# Altium footprint library chipfc_libs.PCBLIB: 315 footprints (part 20 of 20)
Each footprint in its own frame and in the unit in brackets; x right, y up, seen from the top. Pads: shape width x height; smd on the part's side, far side on the other; paste and mask are expansions set on the pad; w line width, h text height; cw(c..) or ccw(c..) is an arc to the next point about the centre after c.
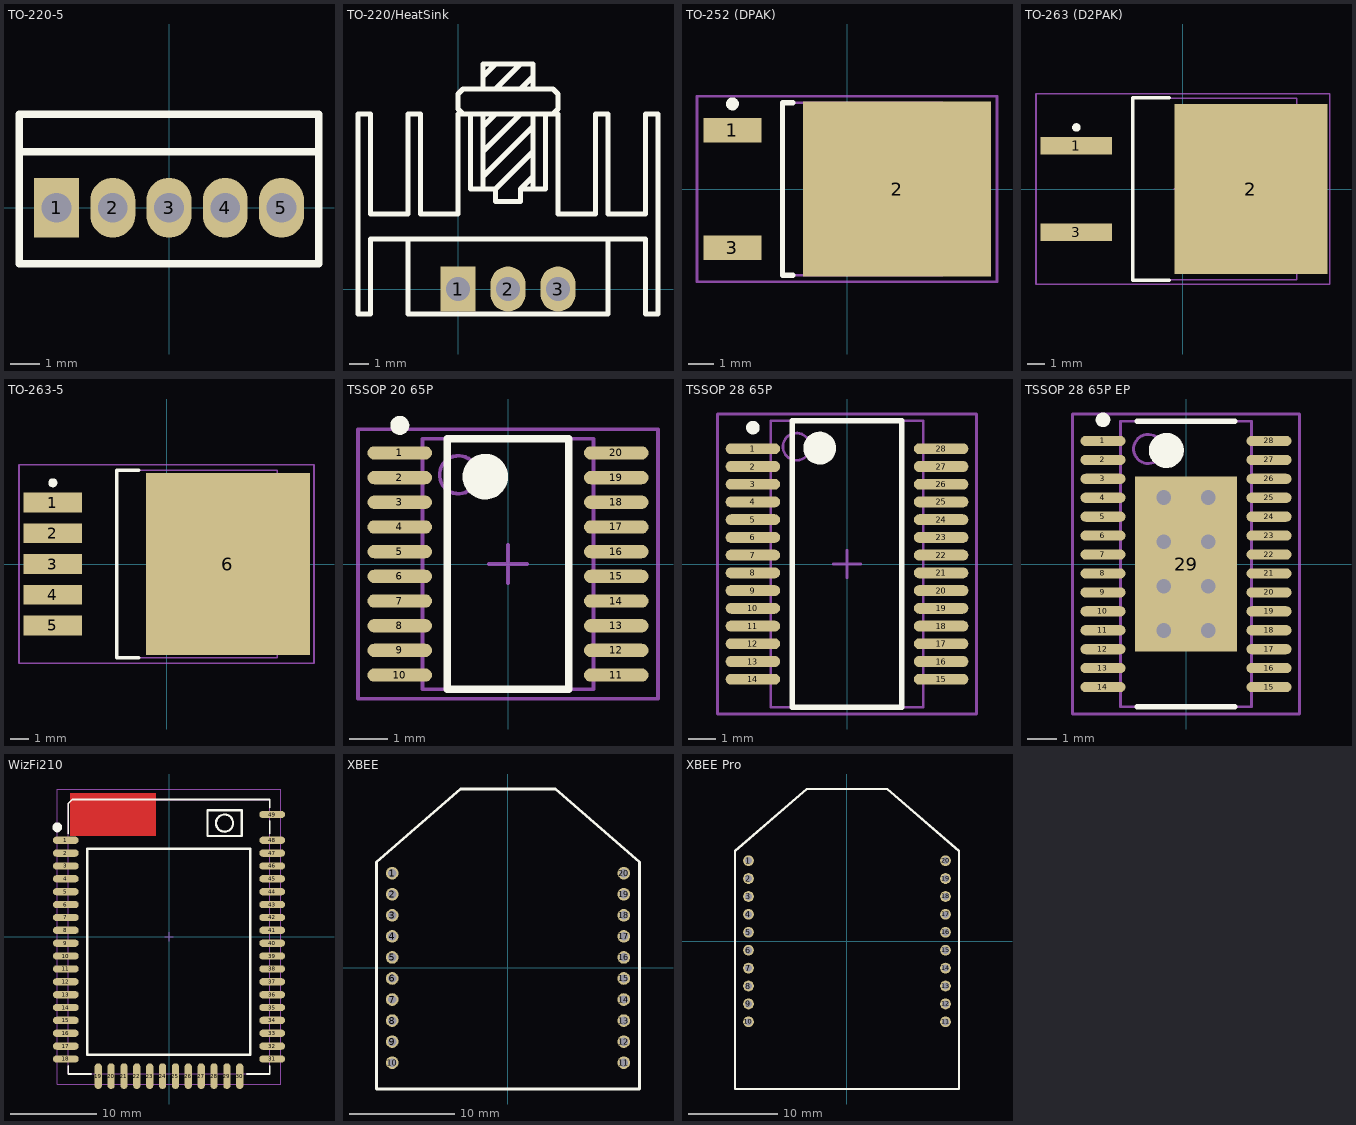
[diagram p19: the footprints below, top view; thin cyan lines are the x and y axes]

## TO-220-5 [mil]
pads (5):
  rect 60x80 hole 39.37: 1(-150,0)
  oval 60x80 hole 39.37: 2(-75,0) 3(0,0) 4(75,0) 5(150,0)
Top Overlay:
  lines w10: -200,75 200,75 ; -200,-75 200,-75 200,125 -200,125 -200,-75

## TO-220/HeatSink [mil]
pads (3):
  rect 70x90 / inner rect 70x70 / far side rect 70x90 hole 47.24: 1(0,0)
  oval 70x90 / inner round 70 / far side oval 70x90 hole 47.24: 2(100,0) 3(200,0)
Top Overlay:
  lines w10: -100,100 -100,-50 300,-50 300,100 ; 50,200 50,350 ; 50,225 150,325 ; 50,275 125,350 ; 50,325 75,350 ; 50,400 50,450 150,450 150,400 ; 50,425 75,450 ; 75,400 125,450 ; 125,400 150,425 ; 150,200 150,350 ; 150,225 125,200 ; 150,275 75,200 ; 75,200 25,200 25,350 0,350 0,150 -75,150 -75,350 -100,350 -100,150 -175,150 -175,350 -200,350 -200,100 -200,-50 -175,-50 -175,100 375,100 375,-50 400,-50 400,100 400,350 375,350 375,150 300,150 300,350 275,350 275,150 200,150 200,350 10,350 0,360 0,390 10,400 190,400 200,390 200,360 190,350 175,350 175,200 125,200 ; 75,200 75,175 125,175 125,200
3D body "CircuitWorks-TO-220HS.step": height 805, standoff -75, extent -100,-50 300,130
3D body "User Library-heatsink TO126.step": height 984.25, standoff -149.61, extent -190.97,-51.58 390.97,373.67

## TO-252 (DPAK) [mm] "D-PAK, 3-Pads, Body 6.2x6.7mm (max), IPC Medium Density"
height 2.4
pads (3):
  rect 2.25x0.95 smd: 1(-4.45,2.28) 3(-4.45,-2.28)
  rect 7.3x6.8 smd: 2(1.95,0)
Top Overlay:
  circle w0.25: c-4.45,3.305 r0.125
  lines w0.2: -2.1,-3.35 -2.5,-3.35 -2.5,3.35 -2.1,3.35
Mechanical 13:
  lines w0.1: -2.5,-3.35 -2.5,3.35 3.7,3.35 3.7,-3.35 -2.5,-3.35
Mechanical 15:
  lines w0.1: -0.5,0 0.5,0 ; 0,-0.5 0,0.5 ; -5.825,-3.6 -5.825,3.6 5.825,3.6 5.825,-3.6 -5.825,-3.6
3D body "User Library-DPAK-1.step": height 2.41, standoff 0, extent -4.541,-3.27 5.398,3.27

## TO-263 (D2PAK) [mm]
height 4.83
pads (3):
  rect 4.2x1.05 smd: 1(-6.25,2.54) 3(-6.25,-2.54)
  rect 9x10 smd: 2(4,0)
Top Overlay:
  circle w0.25: c-6.25,3.615 r0.125
  lines w0.2: -0.8,-5.35 -2.95,-5.35 -2.95,5.35 -0.8,5.35
Mechanical 13:
  lines w0.1: -2.95,-5.325 6.7,-5.325 6.7,5.325 -2.95,5.325 -2.95,-5.325
Mechanical 15:
  lines w0.1: -0.5,0 0.5,0 ; 0,-0.5 0,0.5 ; -8.625,-5.6 8.625,-5.6 8.625,5.6 -8.625,5.6 -8.625,-5.6
3D body "SW3dPS-TO263-3S.STEP": height 4.78, standoff -0.02, extent -7.53,-5 8.14,5

## TO-263-5 [mm] "D2-PAK, 6-Pads, Body 8.9x10.4mm (max), IPC Medium Density"
height 4.65
pads (6):
  rect 3.25x1.1 smd: 1(-6.3,3.4) 2(-6.3,1.7) 3(-6.3,0) 4(-6.3,-1.7) 5(-6.3,-3.4)
  rect 9.1x10.1 smd: 6(3.4,0)
Top Overlay:
  circle w0.25: c-6.3,4.5 r0.125
  lines w0.2: -1.55,-5.2 -2.75,-5.2 -2.75,5.2 -1.55,5.2
Mechanical 13:
  lines w0.1: -2.75,-5.2 -2.75,5.2 6.14,5.2 6.14,-5.2 -2.75,-5.2
Mechanical 15:
  lines w0.1: -0.5,0 0.5,0 ; 0,-0.5 0,0.5 ; -8.175,-5.5 -8.175,5.5 8.175,5.5 8.175,-5.5 -8.175,-5.5
3D body "SW3dPS-TO263-5.STEP": height 4.83, standoff 0.03, extent -7.556,-4.978 8.114,5.022

## TSSOP 20 65P [mm] "TSOP, 20-Leads, Body 6.6x4.5mm (max), Pitch 0.65mm, IPC Medium Density"
height 1.1
pads (20):
  oval 1.7x0.35 smd: 1(-2.85,2.925) 2(-2.85,2.275) 3(-2.85,1.625) 4(-2.85,0.975) 5(-2.85,0.325) 6(-2.85,-0.325) 7(-2.85,-0.975) 8(-2.85,-1.625) 9(-2.85,-2.275) 10(-2.85,-2.925) 11(2.85,-2.925) 12(2.85,-2.275) 13(2.85,-1.625) 14(2.85,-0.975) 15(2.85,-0.325) 16(2.85,0.325) 17(2.85,0.975) 18(2.85,1.625) 19(2.85,2.275) 20(2.85,2.925)
Top Overlay:
  circle w0.25: c-2.85,3.65 r0.125
  circle w0.6: c-0.6,2.3 r0.3
  lines w0.2: -1.6,-3.3 -1.6,3.3 1.6,3.3 1.6,-3.3 -1.6,-3.3
Mechanical 13:
  circle w0.1: c-1.3,2.35 r0.5
  lines w0.1: -2.25,-3.3 -2.25,3.3 2.25,3.3 2.25,-3.3 -2.25,-3.3
Mechanical 15:
  lines w0.1: -0.5,0 0.5,0 ; 0,-0.5 0,0.5 ; -3.95,-3.55 -3.95,3.55 3.95,3.55 3.95,-3.55 -3.95,-3.55
3D body "TSSOP-20.STEP": height 1, standoff 0, extent -3.2,-3.25 3.21,3.25

## TSSOP 28 65P [mm] "SOP, 28-Leads, Body 10.5x5.6mm (max), Pitch 0.65mm, IPC Medium Density"
height 2
pads (28):
  oval 2x0.4 smd: 1(-3.45,4.225) 2(-3.45,3.575) 3(-3.45,2.925) 4(-3.45,2.275) 5(-3.45,1.625) 6(-3.45,0.975) 7(-3.45,0.325) 8(-3.45,-0.325) 9(-3.45,-0.975) 10(-3.45,-1.625) 11(-3.45,-2.275) 12(-3.45,-2.925) 13(-3.45,-3.575) 14(-3.45,-4.225) 15(3.45,-4.225) 16(3.45,-3.575) 17(3.45,-2.925) 18(3.45,-2.275) 19(3.45,-1.625) 20(3.45,-0.975) 21(3.45,-0.325) 22(3.45,0.325) 23(3.45,0.975) 24(3.45,1.625) 25(3.45,2.275) 26(3.45,2.925) 27(3.45,3.575) 28(3.45,4.225)
Top Overlay:
  circle w0.6: c-1,4.25 r0.3
  circle w0.25: c-3.45,5 r0.125
  lines w0.2: -2,-5.25 2,-5.25 2,5.25 -2,5.25 -2,-5.25
Mechanical 13:
  circle w0.1: c-1.85,4.3 r0.5
  lines w0.1: -2.8,-5.25 2.8,-5.25 2.8,5.25 -2.8,5.25 -2.8,-5.25
Mechanical 15:
  lines w0.1: -0.5,0 0.5,0 ; 0,-0.5 0,0.5 ; -4.75,-5.5 4.75,-5.5 4.75,5.5 -4.75,5.5 -4.75,-5.5
3D body "SW3dPS-TSSOP-28_P065.STEP": height 0.97, standoff -0.02, extent -3.2,-4.85 3.2,4.85

## TSSOP 28 65P EP [mm] "TSOP, 28-Leads, Body 9.8x4.5mm (max), Pitch 0.65mm, IPC Medium Density"
height 1.1
pads (29):
  oval 1.55x0.35 smd: 1(-2.85,4.225) 2(-2.85,3.575) 3(-2.85,2.925) 4(-2.85,2.275) 5(-2.85,1.625) 6(-2.85,0.975) 7(-2.85,0.325) 8(-2.85,-0.325) 9(-2.85,-0.975) 10(-2.85,-1.625) 11(-2.85,-2.275) 12(-2.85,-2.925) 13(-2.85,-3.575) 14(-2.85,-4.225) 15(2.85,-4.225) 16(2.85,-3.575) 17(2.85,-2.925) 18(2.85,-2.275) 19(2.85,-1.625) 20(2.85,-0.975) 21(2.85,-0.325) 22(2.85,0.325) 23(2.85,0.975) 24(2.85,1.625) 25(2.85,2.275) 26(2.85,2.925) 27(2.85,3.575) 28(2.85,4.225)
  rect 3.5x6 smd: 29(0,0)
via 0.762,-2.286 diameter 1.016 hole 0.508
via -0.762,-2.286 diameter 1.016 hole 0.508
via 0.762,-0.762 diameter 1.016 hole 0.508
via -0.762,-0.762 diameter 1.016 hole 0.508
via 0.762,0.762 diameter 1.016 hole 0.508
via -0.762,0.762 diameter 1.016 hole 0.508
via -0.762,2.286 diameter 1.016 hole 0.508
via 0.762,2.286 diameter 1.016 hole 0.508
Top Overlay:
  circle w0.25: c-2.85,4.95 r0.125
  circle w0.6: c-0.675,3.9 r0.3
  lines w0.2: -1.675,-4.9 1.675,-4.9 ; -1.675,4.9 1.675,4.9
Mechanical 13:
  circle w0.1: c-1.3,3.95 r0.5
  lines w0.1: -2.25,-4.9 -2.25,4.9 2.25,4.9 2.25,-4.9 -2.25,-4.9
Mechanical 15:
  lines w0.1: -0.5,0 0.5,0 ; 0,-0.5 0,0.5 ; -3.9,-5.15 -3.9,5.15 3.9,5.15 3.9,-5.15 -3.9,-5.15
3D body "SW3dPS-TSSOP-28_P065.STEP": height 0.97, standoff -0.02, extent -3.2,-4.85 3.2,4.85

## WizFi210 [mm] "WIZnet's Serial to WiFi module"
height 2.9
pads (49):
  oval 3x0.85 smd: 1(-12.025,11.234) 2(-12.025,9.734) 3(-12.025,8.234) 4(-12.025,6.734) 5(-12.025,5.234) 6(-12.025,3.734) 7(-12.025,2.234) 8(-12.025,0.734) 9(-12.025,-0.766) 10(-12.025,-2.266) 11(-12.025,-3.766) 12(-12.025,-5.266) 13(-12.025,-6.766) 14(-12.025,-8.266) 15(-12.025,-9.766) 16(-12.025,-11.266) 17(-12.025,-12.766) 18(-12.025,-14.266) 31(12.025,-14.266) 32(12.025,-12.766) 33(12.025,-11.266) 34(12.025,-9.766) 35(12.025,-8.266) 36(12.025,-6.766) 37(12.025,-5.266) 38(12.025,-3.766) 39(12.025,-2.266) 40(12.025,-0.766) 41(12.025,0.734) 42(12.025,2.234) 43(12.025,3.734) 44(12.025,5.234) 45(12.025,6.734) 46(12.025,8.234) 47(12.025,9.734) 48(12.025,11.234) 49(12.025,14.234)
  oval 0.85x3 smd: 19(-8.25,-16.266) 20(-6.75,-16.266) 21(-5.25,-16.266) 22(-3.75,-16.266) 23(-2.25,-16.266) 24(-0.75,-16.266) 25(0.75,-16.266) 26(2.25,-16.266) 27(3.75,-16.266) 28(5.25,-16.266) 29(6.75,-16.266) 30(8.25,-16.266)
Top Layer:
  pour cut-out: -11.525,16.734 -1.525,16.734 -1.525,11.734 -11.525,11.734
Top Overlay:
  circle w0.635: c-13.025,12.734 r0.25
  circle w0.254: c6.475,13.234 r1
  lines w0.2: -11.75,-15.091 -11.75,-16.016 -9.075,-16.016 ; -11.75,11.984 -11.75,15.522 -11.288,15.984 11.75,15.984 11.75,15.059 ; 9.075,-16.016 11.75,-16.016 11.75,-15.091 ; 11.75,11.984 11.75,13.484
  lines w0.254: -9.525,-13.766 9.475,-13.766 9.475,10.234 -9.525,10.234 -9.525,-13.766 ; 4.475,11.734 8.475,11.734 8.475,14.734 4.475,14.734 4.475,11.734
Mechanical 13:
  lines w0.1: -11.75,-15.991 11.75,-15.991 11.75,15.959 -11.288,15.959 -11.75,15.497 -11.75,-15.991
Mechanical 15:
  lines w0.1: -0.5,-0.016 0.5,-0.016 ; 0,-0.516 0,0.484 ; -13,-17.241 13,-17.241 13,17.209 -13,17.209 -13,-17.241

## XBEE [mm]
pads (20):
  round 1.2 hole 0.8: 1(-11,9) 2(-11,7) 3(-11,5) 4(-11,3) 5(-11,1) 6(-11,-1) 7(-11,-3) 8(-11,-5) 9(-11,-7) 10(-11,-9) 11(11,-9) 12(11,-7) 13(11,-5) 14(11,-3) 15(11,-1) 16(11,1) 17(11,3) 18(11,5) 19(11,7) 20(11,9)
Top Overlay:
  lines w0.254: -12.5,-11.5 12.5,-11.5 12.5,10.067 4.5,17 -4.5,17 -12.5,10.067 -12.5,-11.5
3D body "User Library-XBee-Chip.STEP": height 3.53, standoff -3.97, extent -12.25,-11.185 12.25,16.715

## XBEE Pro [mm]
pads (20):
  round 1.2 hole 0.8: 1(-11,9) 2(-11,7) 3(-11,5) 4(-11,3) 5(-11,1) 6(-11,-1) 7(-11,-3) 8(-11,-5) 9(-11,-7) 10(-11,-9) 11(11,-9) 12(11,-7) 13(11,-5) 14(11,-3) 15(11,-1) 16(11,1) 17(11,3) 18(11,5) 19(11,7) 20(11,9)
Top Overlay:
  lines w0.254: -12.5,-16.5 -12.5,10.067 -4.5,17 4.5,17 12.5,10.067 12.5,-16.5 -12.5,-16.5
3D body "User Library-XBP24BZ7SIT-004-radio.step": height 6.5, standoff -3.38, extent -12.192,-16.51 12.192,30.861